# EAGLE library part DS1013_12SSIB1 (library Sirokko-parts)
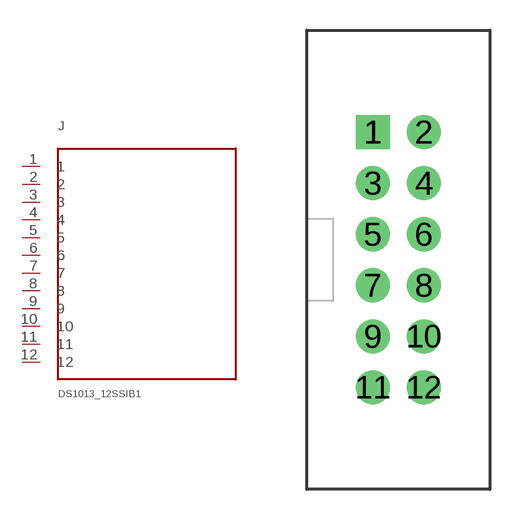
[diagram p0: symbol with the pads of DS1013_12SSIB1; footprint DS1013_12SSIB1]

Designator prefix J

## DS1013_12SSIB1  [DS1013_12SSIB1]
1  1  pas
2  2  pas
3  3  pas
4  4  pas
5  5  pas
6  6  pas
7  7  pas
8  8  pas
9  9  pas
10  10  pas
11  11  pas
12  12  pas

## Footprint DS1013_12SSIB1 (pad centres in mm)
drill 1.02 pad 1.7 square: 1 0,0
drill 1.02 pad 1.7: 2 2.54,0; 3 0,-2.54; 4 2.54,-2.54; 5 0,-5.08; 6 2.54,-5.08; 7 0,-7.62; 8 2.54,-7.62; 9 0,-10.16; 10 2.54,-10.16; 11 0,-12.7; 12 2.54,-12.7